# Altium footprint library MISKO.PcbLib: 37 footprints (part 2 of 3)
Each footprint in its own frame and in the unit in brackets; x right, y up, seen from the top. Pads: shape width x height; smd on the part's side, far side on the other; paste and mask are expansions set on the pad; w line width, h text height; cw(c..) or ccw(c..) is an arc to the next point about the centre after c.
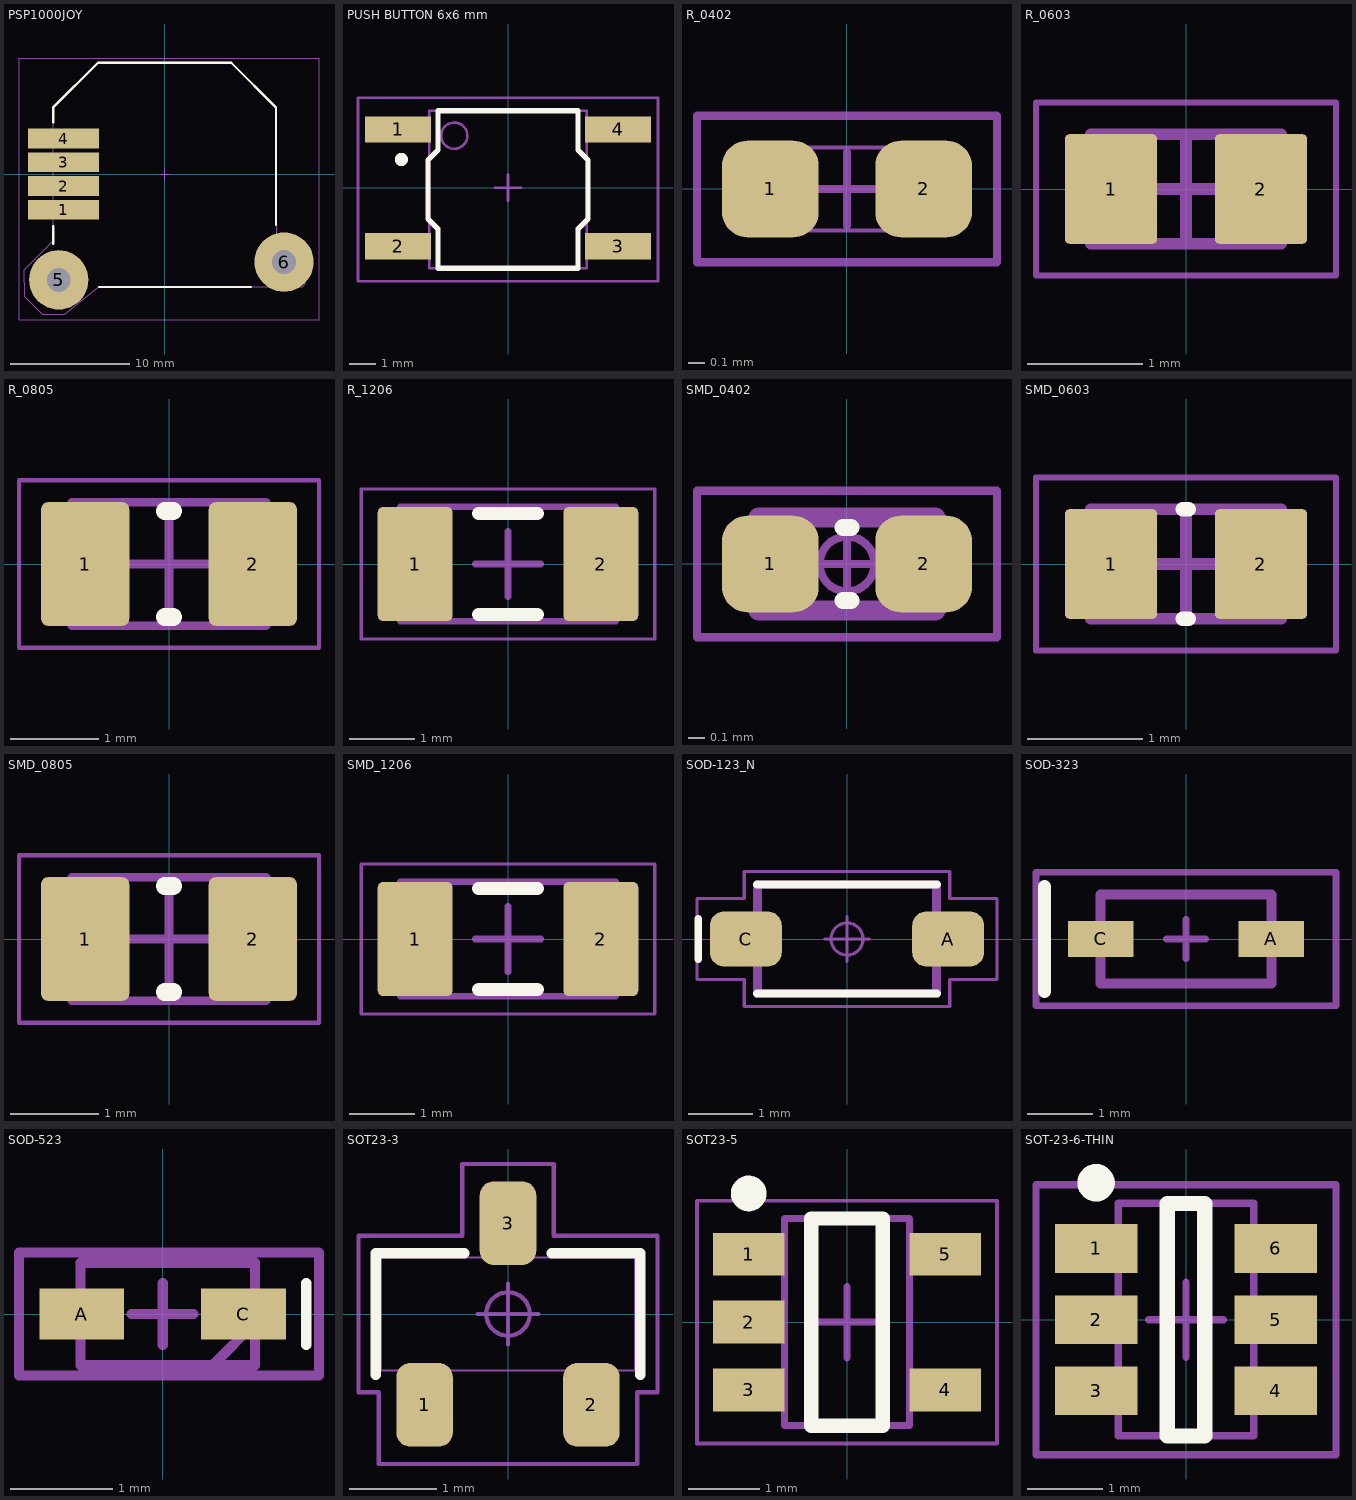
[diagram p1: the footprints below, top view; thin cyan lines are the x and y axes]

## PSP1000JOY [mm]
pads (6):
  rect 6x1.65 smd: 1(-8.5,-3) 2(-8.5,-1) 3(-8.5,1) 4(-8.5,3)
  round 5 hole 2: 5(-8.904,-8.904) 6(10.055,-7.4)
Top Overlay:
  lines w0.2: -9.38,-5.87 -9.38,-5.6 -9.38,-4.38 ; -9.38,4.38 -9.38,5.6 -5.6,9.38 5.62,9.38 9.38,5.62 9.38,-4.25 ; -5.492,-9.5 7.25,-9.5
Top Component Outline:
  circle w0.102: c-7.62,-3.048 r0.568
  lines w0.102: -11.825,-10.277 -11.825,-9.136 -11.825,-8.045 -9.38,-5.6 -9.38,5.6 -5.53,9.458 5.53,9.48 9.38,5.6 9.398,-5.588 11.588,-5.588 11.836,-5.837 11.836,-8.382 11.836,-9.231 11.588,-9.48 -5.53,-9.48 -8.395,-11.808 -10.293,-11.808 -11.825,-10.277
Top Component courtyard:
  lines w0.05: -12.25,-12.25 -12.25,9.75 13,9.75 13,-12.25 -12.25,-12.25
  lines w0.1: -0.5,0 0.5,0 ; 0,-0.5 0,0.5
3D body "User Library-PSP1000 Joystick v7.step": height 9.65, standoff 0.01, extent -11.825,-11.824 12.1,9.48

## PUSH BUTTON 6x6 mm [mm]
pads (4):
  rect 2.5x1 smd: 1(-4.191,2.222) 2(-4.191,-2.222) 3(4.191,-2.222) 4(4.191,2.222)
Top Overlay:
  circle w0.25: c-4.064,1.079 r0.125
  lines w0.2: -3.048,-1.182 -3.048,1.055 -2.667,1.436 -2.667,2.936 2.667,2.936 2.667,1.436 3.048,1.055 3.048,-1.182 2.667,-1.563 2.667,-3.063 -2.667,-3.063 -2.667,-1.563 -3.048,-1.182
Top Component Outline:
  circle w0.1: c-2.05,1.987 r0.5
  lines w0.1: -3,-3.063 -3,2.936 3,2.936 3,-3.063 -3,-3.063
Top Component courtyard:
  lines w0.1: -0.5,0 0.5,0 ; 0,-0.5 0,0.5 ; -5.715,-3.564 -5.715,3.437 5.715,3.437 5.715,-3.564 -5.715,-3.564
3D body "User Library-switch.step": height 5, standoff 0, extent -4.445,-2.984 4.555,3.016

## R_0402 [mm] "Resistor, Chip; 1.00 mm L X 0.50 mm W X 0.40 mm H body"
height 0.4
pads (2):
  rrect52% 0.58x0.58 smd: 1(-0.46,0) 2(0.46,0)
Top Component Outline:
  lines w0.025: -0.5,-0.25 0.5,-0.25 0.5,0.25 -0.5,0.25 -0.5,-0.25
Top Component courtyard:
  lines w0.05: -0.22,0 0.22,0 ; 0,-0.22 0,0.22 ; -0.9,-0.44 0.9,-0.44 0.9,0.44 -0.9,0.44 -0.9,-0.44
3D body "R1005_0402I_N.STEP": height 0.4, standoff 0, extent -0.5,-0.25 0.5,0.25

## R_0603 [mm] "Chip Resistor, 2-Leads, Body 1.57x0.85mm, IPC Medium Density"
height 0.5
pads (2):
  rrect10% 0.8x0.95 smd: 1(-0.65,0) 2(0.65,0)
Top Component Outline:
  lines w0.1: -0.825,-0.475 -0.825,0.475 0.825,0.475 0.825,-0.475 -0.825,-0.475
Top Component courtyard:
  lines w0.05: -1.3,-0.75 -1.3,0.75 1.3,0.75 1.3,-0.75 -1.3,-0.75
  lines w0.1: -0.475,0 0.475,0 ; 0,-0.475 0,0.475
3D body "R0603(1608)_N.step": height 0.5, standoff 0, extent -0.825,-0.475 0.825,0.475

## R_0805 [mm] "Chip Resistor, 2-Leads, Body 2.05x1.25mm, IPC Medium Density"
height 0.8
pads (2):
  rrect15% 1x1.4 smd: 1(-0.95,0) 2(0.95,0)
Top Overlay:
  lines w0.2: -0.05,-0.6 0.05,-0.6 ; -0.05,0.6 0.05,0.6
Top Component Outline:
  lines w0.1: -1.1,-0.7 -1.1,0.7 1.1,0.7 1.1,-0.7 -1.1,-0.7
Top Component courtyard:
  lines w0.05: -1.7,-0.95 -1.7,0.95 1.7,0.95 1.7,-0.95 -1.7,-0.95
  lines w0.1: -0.5,0 0.5,0 ; 0,-0.5 0,0.5
3D body "R0805_N.step": height 0.8, standoff 0, extent -1.1,-0.7 1.1,0.7

## R_1206 [mm] "Chip Resistor, 2-Leads, Body 3.15x1.60mm, IPC Medium Density"
height 0.6
pads (2):
  rrect15% 1.15x1.75 smd: 1(-1.425,0) 2(1.425,0)
Top Overlay:
  lines w0.2: -0.45,-0.775 0.45,-0.775 ; -0.45,0.775 0.45,0.775
Top Component Outline:
  lines w0.1: -1.65,-0.875 1.65,-0.875 1.65,0.875 -1.65,0.875 -1.65,-0.875
Top Component courtyard:
  lines w0.05: -2.25,-1.15 2.25,-1.15 2.25,1.15 -2.25,1.15 -2.25,-1.15
  lines w0.1: -0.5,0 0.5,0 ; 0,-0.5 0,0.5
3D body "R1206(3216)_N.step": height 0.6, standoff 0, extent -1.65,-0.875 1.65,0.875

## SMD_0402 [mm] "Chip; 1.00 mm L X 0.50 mm W X 0.40 mm H body"
height 0.4
pads (2):
  rrect52% 0.58x0.58 smd: 1(-0.46,0) 2(0.46,0)
Top Overlay:
  lines w0.102: -0.025,-0.22 0.025,-0.22 ; -0.025,0.22 0.025,0.22
Top Component Outline:
  lines w0.025: -0.5,-0.25 -0.5,0.25 0.5,0.25 0.5,-0.25 -0.5,-0.25
  lines w0.12: -0.53,-0.28 -0.53,0.28 0.53,0.28 0.53,-0.28 -0.53,-0.28
Top Component courtyard:
  circle w0.05: c0,0 r0.165
  lines w0.05: -0.22,0 0.22,0 ; 0,-0.22 0,0.22 ; -0.9,-0.44 -0.9,0.44 0.9,0.44 0.9,-0.44 -0.9,-0.44
3D body "R1005_0402I_N.STEP": height 0.4, standoff 0, extent -0.5,-0.25 0.5,0.25

## SMD_0603 [mm] "Chip 2-Leads, Body 1.57x0.85mm, IPC Medium Density"
height 0.5
pads (2):
  rrect10% 0.8x0.95 smd: 1(-0.65,0) 2(0.65,0)
Top Overlay:
  lines w0.127: -0.025,-0.475 0.025,-0.475 ; -0.025,0.475 0.025,0.475
Top Component Outline:
  lines w0.1: -0.825,-0.475 0.825,-0.475 0.825,0.475 -0.825,0.475 -0.825,-0.475
Top Component courtyard:
  lines w0.05: -1.3,-0.75 1.3,-0.75 1.3,0.75 -1.3,0.75 -1.3,-0.75
  lines w0.1: -0.475,0 0.475,0 ; 0,-0.475 0,0.475
3D body "R0603(1608)_N.step": height 0.5, standoff 0, extent -0.825,-0.475 0.825,0.475

## SMD_0805 [mm] "Chip 2-Leads, Body 2.05x1.25mm, IPC Medium Density"
height 0.8
pads (2):
  rrect15% 1x1.4 smd: 1(-0.95,0) 2(0.95,0)
Top Overlay:
  lines w0.2: -0.05,-0.6 0.05,-0.6 ; -0.05,0.6 0.05,0.6
Top Component Outline:
  lines w0.1: -1.1,-0.7 1.1,-0.7 1.1,0.7 -1.1,0.7 -1.1,-0.7
Top Component courtyard:
  lines w0.05: -1.7,-0.95 1.7,-0.95 1.7,0.95 -1.7,0.95 -1.7,-0.95
  lines w0.1: -0.5,0 0.5,0 ; 0,-0.5 0,0.5
3D body "R0805_N.step": height 0.8, standoff 0, extent -1.1,-0.7 1.1,0.7

## SMD_1206 [mm] "Chip 2-Leads, Body 3.15x1.60mm, IPC Medium Density"
height 0.6
pads (2):
  rrect15% 1.15x1.75 smd: 1(-1.425,0) 2(1.425,0)
Top Overlay:
  lines w0.2: -0.45,-0.775 0.45,-0.775 ; -0.45,0.775 0.45,0.775
Top Component Outline:
  lines w0.1: -1.65,-0.875 -1.65,0.875 1.65,0.875 1.65,-0.875 -1.65,-0.875
Top Component courtyard:
  lines w0.05: -2.25,-1.15 -2.25,1.15 2.25,1.15 2.25,-1.15 -2.25,-1.15
  lines w0.1: -0.5,0 0.5,0 ; 0,-0.5 0,0.5
3D body "R1206(3216)_N.step": height 0.6, standoff 0, extent -1.65,-0.875 1.65,0.875

## SOD-123_N [mm] "Diode, Small Outline Diode (SOD); 2.675 mm L X 1.60 mm W X 1.30 mm H body"
height 1.3
pads (2):
  rrect51% 1.12x0.86 smd: A(1.575,0) C(-1.575,0)
Top Overlay:
  lines w0.12: -2.315,-0.31 -2.315,0.31 ; -1.4,-0.85 1.4,-0.85 ; -1.4,0.85 1.4,0.85
Top Component Outline:
  lines w0.025: -1.338,-0.8 -1.338,0.8 1.338,0.8 1.338,-0.8 -1.338,-0.8
  lines w0.12: -1.4,-0.85 -1.4,0.85 1.4,0.85 1.4,-0.85 -1.4,-0.85
Top Component courtyard:
  circle w0.05: c0,0 r0.25
  lines w0.05: -0.35,0 0.35,0 ; 0,-0.35 0,0.35 ; -2.335,-0.63 -2.335,0.63 -1.6,0.63 -1.6,1.05 1.6,1.05 1.6,0.63 2.335,0.63 2.335,-0.63 1.6,-0.63 1.6,-1.05 -1.6,-1.05 -1.6,-0.63 -2.335,-0.63
3D body "SOD-123_N.STEP": height 1.3, standoff 0, extent -1.8,-0.8 1.8,0.8

## SOD-323 [mm]
pads (2):
  rect 1x0.55 smd: A(1.3,0) C(-1.3,0)
Top Overlay:
  lines w0.2: -2.159,-0.8 -2.159,0.8
Top Component Outline:
  lines w0.152: -1.3,-0.675 1.3,-0.675 1.3,0.675 -1.3,0.675 -1.3,-0.675
Top Component courtyard:
  lines w0.1: -0.3,0 0.3,0 ; 0,-0.3 0,0.3 ; -2.286,-1.016 -2.286,1.016 2.286,1.016 2.286,-1.016 -2.286,-1.016
3D body "SOD-323.step": height 1.1, standoff 0, extent -1.3,-0.675 1.3,0.675

## SOD-523 [mm]
pads (2):
  rect 0.825x0.5 smd: A(-0.788,0) C(0.788,0)
Top Overlay:
  lines w0.102: 1.4,-0.3 1.4,0.3
Top Component Outline:
  lines w0.1: 0.488,-0.5 0.9,-0.088 ; -0.8,-0.5 -0.8,0.5 0.9,0.5 0.9,-0.5 -0.8,-0.5
Top Component courtyard:
  lines w0.1: -0.3,0 0.3,0 ; 0,-0.3 0,0.3 ; -1.4,-0.6 1.524,-0.6 1.524,0.6 -1.4,0.6 -1.4,-0.6
3D body "SC-79.stp": height 0.7, standoff 0, extent -0.825,-0.45 0.875,0.45

## SOT23-3 [mm] "Small Outline Transistor (SOT23), 0.96 mm pitch; 3 pin, 2.92 mm L X 1.30 mm W X 1.12 mm H body"
height 1.12
pads (3):
  rrect49% 0.65x0.96 smd: 1(-0.96,-1.045) 2(0.96,-1.045) 3(0,1.045)
Top Overlay:
  lines w0.12: -1.52,-0.7 -1.52,0.7 -0.505,0.7 ; 0.505,0.7 1.52,0.7 1.52,-0.7
Top Component Outline:
  lines w0.025: -1.46,-0.65 -1.46,0.65 1.46,0.65 1.46,-0.65 -1.46,-0.65
Top Component courtyard:
  circle w0.05: c0,0 r0.25
  lines w0.05: -0.35,0 0.35,0 ; 0,-0.35 0,0.35 ; -1.72,-0.9 -1.72,0.9 -0.525,0.9 -0.525,1.725 0.525,1.725 0.525,0.9 1.72,0.9 1.72,-0.9 1.485,-0.9 1.485,-1.725 -1.485,-1.725 -1.485,-0.9 -1.72,-0.9
3D body "SOT23-3_N.STEP": height 1.12, standoff 0, extent -1.46,-1.185 1.46,1.185

## SOT23-5 [mm]
pads (5):
  rect 1x0.6 smd: 1(-1.375,0.95) 2(-1.375,0) 3(-1.375,-0.95) 4(1.375,-0.95) 5(1.375,0.95)
Top Overlay:
  circle w0.25: c-1.375,1.8 r0.125
  lines w0.2: -0.5,-1.45 0.5,-1.45 0.5,1.45 -0.5,1.45 -0.5,-1.45
Top Component Outline:
  lines w0.1: -0.875,-1.45 0.875,-1.45 0.875,1.45 -0.875,1.45 -0.875,-1.45
Top Component courtyard:
  lines w0.05: -2.1,-1.7 2.1,-1.7 2.1,1.7 -2.1,1.7 -2.1,-1.7
  lines w0.1: -0.5,0 0.5,0 ; 0,-0.5 0,0.5
3D body "User Library-MO-178CSOT-5 (MO-178-AA).STEP": height 1.45, standoff 0, extent -1.405,-1.45 1.405,1.45

## SOT-23-6-THIN [mm] "6-  pin Thin SOT package"
pads (6):
  rect 1.1x0.65 smd: 1(-1.2,0.95) 2(-1.2,0) 3(-1.2,-0.95) 4(1.2,-0.95) 5(1.2,0) 6(1.2,0.95)
Top Overlay:
  circle w0.25: c-1.2,1.825 r0.125
  lines w0.203: -0.25,-1.55 0.25,-1.55 0.25,1.55 -0.25,1.55 -0.25,-1.55
Top Component Outline:
  lines w0.1: -0.9,-1.55 -0.9,1.55 0.9,1.55 0.9,-1.55 -0.9,-1.55
Top Component courtyard:
  lines w0.1: -0.5,0 0.5,0 ; 0,-0.5 0,0.5 ; -2,-1.8 -2,1.8 2,1.8 2,-1.8 -2,-1.8
3D body: height 1, standoff 0, extent -0.9,-1.55 0.9,1.55